# Altium footprint library Sensor$.PcbLib: 43 footprints (part 1 of 3)
Each footprint in its own frame and in the unit in brackets; x right, y up, seen from the top. Pads: shape width x height; smd on the part's side, far side on the other; paste and mask are expansions set on the pad; w line width, h text height; cw(c..) or ccw(c..) is an arc to the next point about the centre after c.
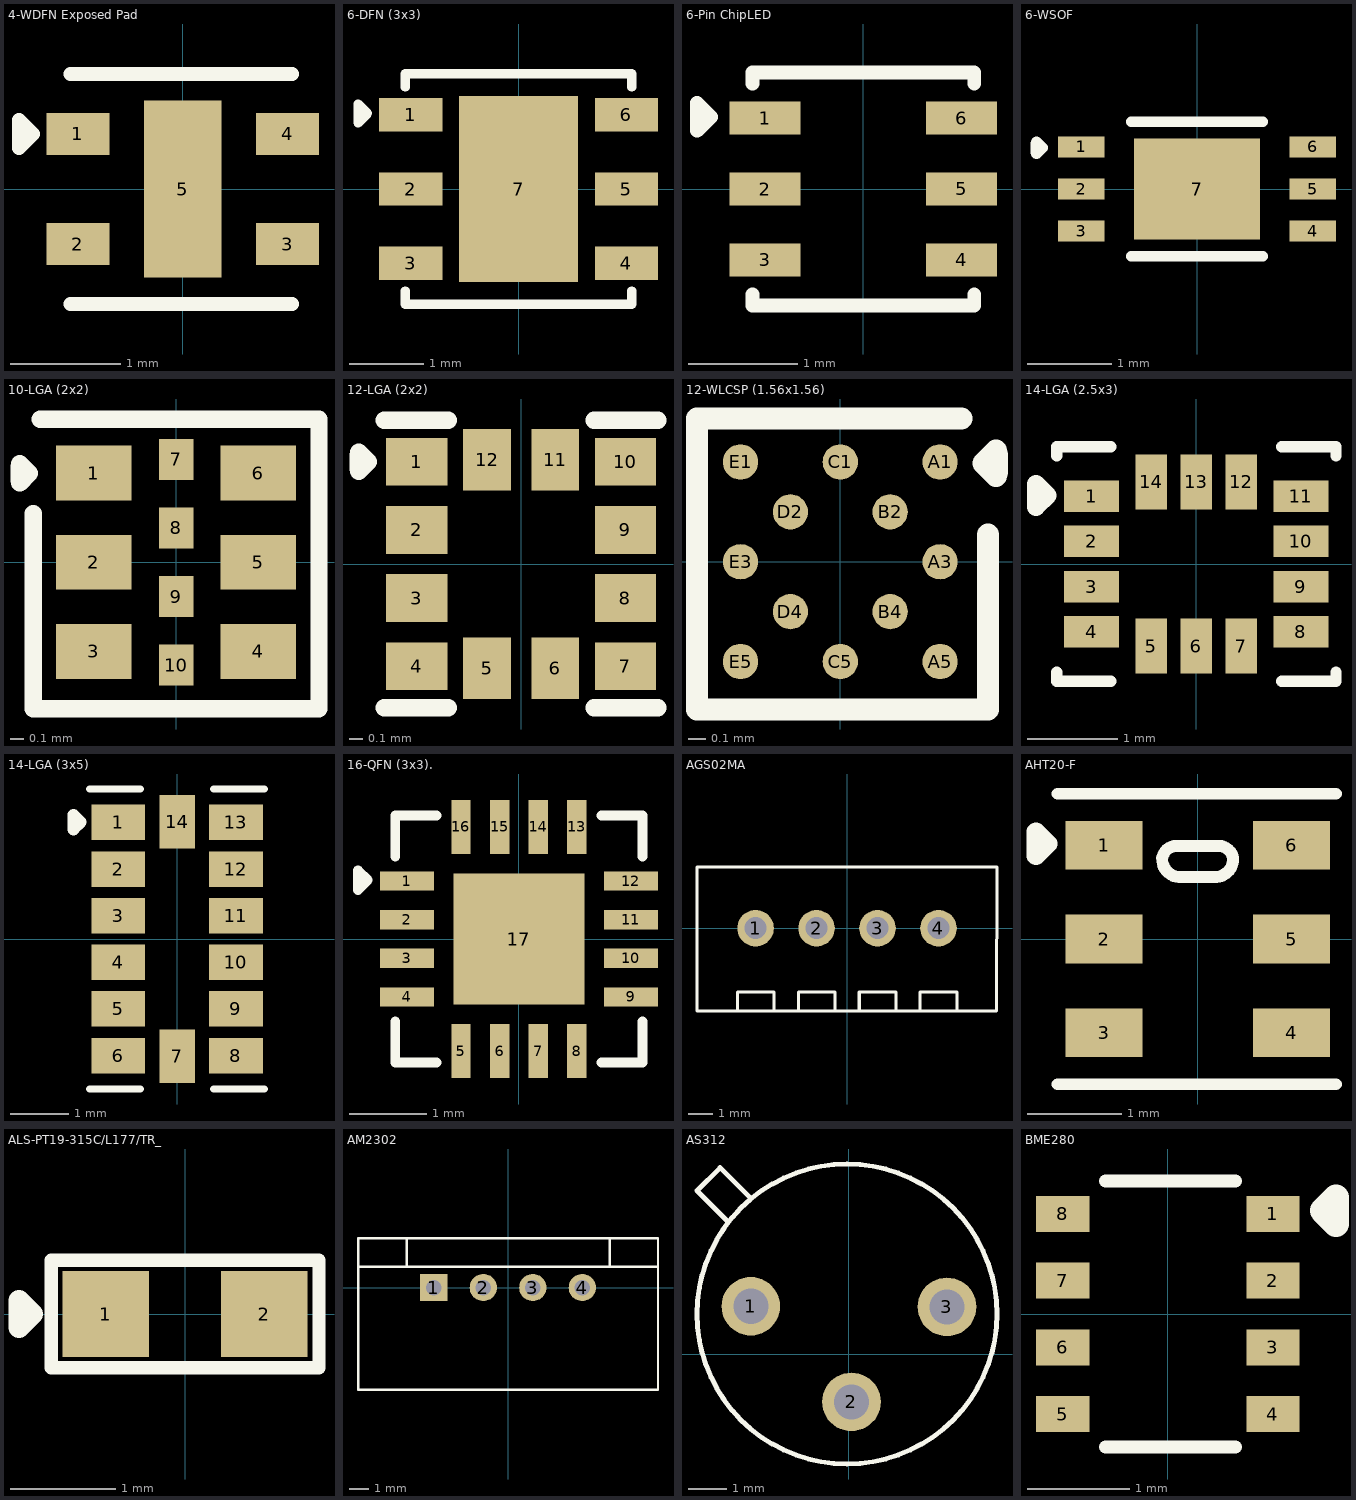
[diagram p0: the footprints below, top view; thin cyan lines are the x and y axes]

## 4-WDFN Exposed Pad [mm]
pads (5):
  rect 0.57x0.38 smd paste+0 mask+0.051: 1(-0.95,0.5) 2(-0.95,-0.5) 3(0.95,-0.5) 4(0.95,0.5)
  rect 0.7x1.6 smd paste+0 mask+0.051: 5(0,0)
Top Overlay:
  lines w0.127: -1.016,-1.041 0.991,-1.041 ; -1.016,1.041 0.991,1.041 ; -1.483,0.373 -1.356,0.5 -1.483,0.627 -1.483,0.373
3D body "SHTC3_SEN.step": height 0.76, standoff 0, extent -1.003,-1.003 1.003,1.003

## 6-DFN (3x3) [mm]
pads (7):
  rect 0.85x0.45 smd: 1(-1.45,1) 2(-1.45,0) 3(-1.45,-1) 4(1.45,-1) 5(1.45,0) 6(1.45,1)
  rect 1.6x2.5 smd: 7(0,0)
Top Overlay:
  lines w0.127: -1.524,-1.372 -1.524,-1.549 1.524,-1.549 1.524,-1.372 ; -1.524,1.372 -1.524,1.549 1.524,1.549 1.524,1.372 ; -2.159,0.889 -2.032,1.016 -2.159,1.143 -2.159,0.889
3D body "SI7021-A20-GM1R.STEP": height 1.21, standoff 0, extent -1.5,-1.5 1.5,1.5

## 6-Pin ChipLED [mm] "SENSOR OPT AMBIENT 6DFN"
pads (6):
  rect 0.65x0.3 smd: 1(-0.9,0.65) 2(-0.9,0) 3(-0.9,-0.65) 4(0.9,-0.65) 5(0.9,0) 6(0.9,0.65)
Top Overlay:
  lines w0.127: -1.016,-1.067 1.016,-1.067 ; -1.016,-1.065 -1.016,-0.965 ; -1.016,0.965 -1.016,1.065 ; -1.016,1.067 1.016,1.067 ; 1.016,-1.065 1.016,-0.965 ; 1.016,0.965 1.016,1.065 ; -1.524,0.533 -1.524,0.787 -1.397,0.66 -1.524,0.533
3D body "LTR-303ALS-01_LTO.step": height 0.71, standoff 0, extent -1.003,-1.003 1.003,1.003

## 6-WSOF [mm]
pads (7):
  rect 0.55x0.25 smd: 1(-1.375,0.5) 2(-1.375,0) 3(-1.375,-0.5) 4(1.375,-0.5) 5(1.375,0) 6(1.375,0.5)
  rect 1.5x1.2 smd: 7(0,0)
Top Overlay:
  lines w0.127: -1.911,0.437 -1.911,0.537 ; -1.906,0.417 -1.835,0.488 -1.906,0.559 ; -0.78,-0.8 0.78,-0.8 ; -0.78,0.8 0.78,0.8
3D body "step_temp.STEP": height 0.75, standoff 0, extent -1.5,-0.8 1.5,0.8

## 10-LGA (2x2) [mm]
pads (10):
  rect 0.55x0.4 smd mask+0.07: 1(-0.6,0.65) 2(-0.6,0) 3(-0.6,-0.65) 4(0.6,-0.65) 5(0.6,0) 6(0.6,0.65)
  rect 0.25x0.3 smd mask+0.07: 7(0,0.75) 8(0,0.25) 9(0,-0.25) 10(0,-0.75)
Top Overlay:
  lines w0.127: -1.146,0.598 -1.146,0.698 ; -1.141,0.578 -1.07,0.648 -1.141,0.719 ; -1.041,0.356 -1.041,-1.067 1.04,-1.067 1.041,-1.065 1.041,1.041 -0.991,1.041
3D body "C2874216.step": height 0.85, standoff 0, extent -1,-1.005 1,1.005

## 12-LGA (2x2) [mm]
pads (12):
  rect 0.45x0.35 smd mask+0.05: 1(-0.765,0.75) 2(-0.765,0.25) 3(-0.765,-0.25) 4(-0.765,-0.75) 7(0.765,-0.75) 8(0.765,-0.25) 9(0.765,0.25) 10(0.765,0.75)
  rect 0.35x0.45 smd mask+0.05: 5(-0.25,-0.765) 6(0.25,-0.765) 11(0.25,0.765) 12(-0.25,0.765)
Top Overlay:
  lines w0.127: -1.197,0.699 -1.197,0.799 ; -1.191,0.679 -1.121,0.75 -1.191,0.821 ; -1.004,-1.054 -0.534,-1.054 ; -1.004,1.054 -0.534,1.054 ; 0.534,-1.054 1.004,-1.054 ; 0.534,1.054 1.004,1.054
3D body "LIS2DH12TR.step": height 1, standoff 0, extent -1,-1 1,1

## 12-WLCSP (1.56x1.56) [mm]
pads (12):
  round 0.2 smd mask+0.05: A1(0.566,0.566) A3(0.566,0) A5(0.566,-0.566) B2(0.283,0.283) B4(0.283,-0.283) C1(0,0.566) C5(0,-0.566) D2(-0.283,0.283) D4(-0.283,-0.283) E1(-0.566,0.566) E3(-0.566,0) E5(-0.566,-0.566)
Top Overlay:
  lines w0.127: 0.686,0.813 -0.813,0.813 -0.813,-0.838 0.838,-0.838 0.838,0.152 ; 0.884,0.488 0.813,0.559 0.884,0.63 ; 0.889,0.508 0.889,0.608
3D body "BMM150--3DModel-STEP-56544 (1).STEP": height 0.6, standoff 0, extent -0.755,-0.805 0.805,0.755

## 14-LGA (2.5x3) [mm]
pads (14):
  rect 0.61x0.35 smd mask+0.05: 1(-1.16,0.75) 2(-1.16,0.25) 3(-1.16,-0.25) 4(-1.16,-0.75) 8(1.16,-0.75) 9(1.16,-0.25) 10(1.16,0.25) 11(1.16,0.75)
  rect 0.35x0.61 smd mask+0.05: 5(-0.5,-0.91) 6(0,-0.91) 7(0.5,-0.91) 12(0.5,0.91) 13(0,0.91) 14(-0.5,0.91)
Top Overlay:
  lines w0.127: -1.55,-1.2 -1.55,-1.3 -0.95,-1.3 ; -1.55,1.2 -1.55,1.3 -0.95,1.3 ; 0.95,-1.3 1.55,-1.3 1.55,-1.2 ; 0.95,1.3 1.55,1.3 1.55,1.2
  lines w0.2: -1.778,0.635 -1.778,0.889 -1.651,0.762 -1.778,0.635
3D body "LSM6DSLTR--3DModel-STEP-269445.STEP": height 0.86, standoff 0, extent -1.5,-1.25 1.5,1.25

## 14-LGA (3x5) [mm]
pads (14):
  rect 0.92x0.61 smd mask+0.05: 1(-1.01,2) 2(-1.01,1.2) 3(-1.01,0.4) 4(-1.01,-0.4) 5(-1.01,-1.2) 6(-1.01,-2) 8(1.01,-2) 9(1.01,-1.2) 10(1.01,-0.4) 11(1.01,0.4) 12(1.01,1.2) 13(1.01,2)
  rect 0.61x0.92 smd mask+0.05: 7(0,-2.01) 14(0,2.01)
Top Overlay:
  lines w0.127: -1.5,-2.574 -0.63,-2.574 ; -1.5,2.574 -0.63,2.574 ; 0.63,-2.574 1.5,-2.574 ; 0.63,2.574 1.5,2.574
  lines w0.2: -1.778,1.88 -1.778,2.134 -1.651,2.007 -1.778,1.88
3D body "ADXL345BCCZ-RL7.step": height 1, standoff 0, extent -1.5,-2.5 1.5,2.5

## 16-QFN (3x3). [mm]
pads (17):
  rect 0.7x0.25 smd: 1(-1.45,0.75) 2(-1.45,0.25) 3(-1.45,-0.25) 4(-1.45,-0.75) 9(1.45,-0.75) 10(1.45,-0.25) 11(1.45,0.25) 12(1.45,0.75)
  rect 0.25x0.7 smd: 5(-0.75,-1.45) 6(-0.25,-1.45) 7(0.25,-1.45) 8(0.75,-1.45) 13(0.75,1.45) 14(0.25,1.45) 15(-0.25,1.45) 16(-0.75,1.45)
  rect 1.7x1.7 smd: 17(0,0)
Top Overlay:
  lines w0.127: -1.6,-1.067 -1.6,-1.6 -1.067,-1.6 ; -1.6,1.067 -1.6,1.6 -1.067,1.6 ; 1.067,-1.6 1.6,-1.6 1.6,-1.067 ; 1.067,1.6 1.6,1.6 1.6,1.067 ; -2.083,0.635 -1.956,0.762 -2.083,0.889 -2.083,0.635
3D body "QFN-16_3X3_MNS.step": height 0.99, standoff 0, extent -1.549,-1.549 1.549,1.549

## AGS02MA [mil]
pads (4):
  round 60 hole 36: 1(-150,0) 2(-50,0) 3(50,0) 4(150,0)
Top Overlay:
  lines w5: -179.97,-135.83 -179.97,-105.03 -119.97,-105.03 -119.97,-135.83 ; -79.96,-135.83 -79.96,-105.03 -19.96,-105.03 -19.96,-135.83 ; 20.04,-135.83 20.04,-105.03 80.04,-105.03 80.04,-135.83 ; 120.04,-135.83 120.04,-105.03 180.04,-105.03 180.04,-135.83 ; -246.13,-135.83 -246.13,100.39 246.02,100.39 245.3,-135.83 -246.13,-135.83
3D body "C3012633.step": height 629.92, standoff -196.85, extent -246.06,-136.02 246.06,100.59

## AHT20-F [mm]
pads (6):
  rect 0.82x0.52 smd: 1(-1,1) 2(-1,0) 3(-1,-1) 4(1,-1) 5(1,0) 6(1,1)
Top Overlay:
  lines w0.127: -1.499,-1.549 1.473,-1.549 ; -1.499,1.549 1.473,1.549 ; 0.194,0.66 ccw(c0.182,0.852) 0.375,0.864 ccw(c0.222,0.838) 0.197,0.991 -0.203,0.991 ccw(c-0.229,0.838) -0.381,0.864 ccw(c-0.189,0.852) -0.2,0.66 0.2,0.66
  lines w0.2: -1.727,0.889 -1.727,1.143 -1.6,1.016 -1.727,0.889
3D body "3D_PCB_NEW_PCB_2023-07-21_2023-07-21 (1).STEP": height 1, standoff 0, extent -1.5,-1.499 1.5,1.501

## ALS-PT19-315C/L177/TR_ [mm]
pads (2):
  rect 0.82x0.82 smd: 1(-0.75,0) 2(0.75,0)
Top Overlay:
  lines w0.127: 1.245,0.508 -1.27,0.508 -1.27,-0.508 1.27,-0.508 1.27,0.508
  lines w0.2: -1.575,-0.127 -1.448,0 -1.575,0.127 -1.575,-0.127
3D body "TR8--3DModel-STEP-56544 (1).STEP": height 0.6, standoff 0, extent -0.85,-0.4 0.85,0.4

## AM2302 [mm]
pads (4):
  rect 1.4x1.4 hole 0.8: 1(-3.81,0)
  round 1.4 hole 0.8: 2(-1.27,0) 3(1.27,0) 4(3.81,0)
Top Overlay:
  lines w0.127: -7.705,1.072 7.695,1.072 ; -5.193,1.123 -5.193,2.522 ; 5.217,1.103 5.217,2.503 ; -7.703,-5.258 -7.703,2.543 7.697,2.543 7.697,-5.258 -7.703,-5.258
3D body "AM2302.step": height 25.24, standoff -4.5, extent -7.719,-5.273 7.681,2.528

## AS312 [mil]
pads (3):
  round 60 hole 36 paste+0 mask+2: 1(-100.4,48.95) 2(2.6,-48.95) 3(100.4,48.35)
Top Overlay:
  circle w5: c-1.94,41.04 r153.54
  lines w5: -123.27,135.08 -155.51,167.32 -131.89,190.94 -100.15,159.2
3D body "AS312.step": height 177.17, standoff -137.79, extent -179.21,-129.85 179.06,228.37

## BME280 [mm]
pads (8):
  rect 0.52x0.35 smd: 1(1.025,0.975) 2(1.025,0.325) 3(1.025,-0.325) 4(1.025,-0.975) 5(-1.025,-0.975) 6(-1.025,-0.325) 7(-1.025,0.325) 8(-1.025,0.975)
Top Overlay:
  lines w0.127: -0.61,-1.295 0.66,-1.295 ; -0.61,1.295 0.66,1.295
  lines w0.254: 1.512,1.007 1.639,1.134 1.639,0.88 1.512,1.007
3D body "BME280--3DModel-STEP-56544.STEP": height 1, standoff 0, extent -1.25,-1.25 1.25,1.25